# Altium schematic symbol library Fuse%.SchLib: 55 symbols
Pins are listed as number, name and electrical type; pins without a type are passive.

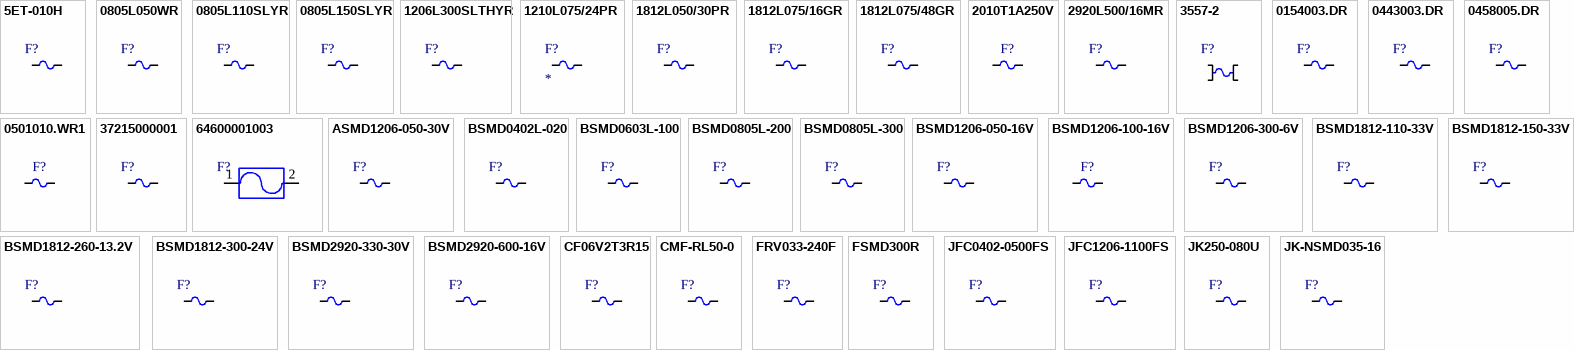
[diagram p0: symbols 5ET-010H to JK-NSMD035-16]

## 5ET-010H
designator F?
1A Plugin Fuses ROHS; Manufacturer: HOLLY; Manufacturer Part Number: 5ET-010H; Item Type: Fuse; Package: Plugin; ComponentLink1Description: LCSC; ComponentLink1URL: https://www.lcsc.com/product-detail/Fuses_HOLLY-5ET-010H_C356417.html; LCSC Part Number: C356417
footprint 5ET-010H
pins: 1, 2

## 0805L050WR
designator F?
6V 500mA 100A 1A 0805 Resettable Fuses ROHS; Manufacturer: Littelfuse; Manufacturer Part Number: 0805L050WR; Item Type: Fuse; Supplier: DigiKey; Supplier Part Number: F2772CT-ND; RoHS: Yes; Category: PTC Resettable Fuses; Stock: 52328; Pricing: 1=0.5, 5=0.41, 10=0.378, 50=0.314, 100=0.2897, 250=0.2604, 500=0.2402, 1000=0.2215 (USD); Voltage Rating: 6V; Width: 1.2mm; Height: 1.25mm; Lead Free: 5697LeadFree; ComponentLink1URL: https://datasheet.ciiva.com/326/littelfuse-ptc-0805l-326196.pdf?src-supplier=Digikey; ComponentLink1Description: https://datasheet.ciiva.com/326/littelfuse-ptc-0805l-326196.pdf?src-supplier=Digikey; ComponentLink2URL: https://datasheet.ciiva.com/4501/littelfuse-0805l-32472-4501285.pdf?src-supplier=Mouser; ComponentLink2Description: https://datasheet.ciiva.com/4501/littelfuse-0805l-32472-4501285.pdf?src-supplier=Mouser; ComponentLink3URL: https://datasheet.ciiva.com/28410/147852-28410764.pdf?src-supplier=Element14; ComponentLink3Description: https://datasheet.ciiva.com/28410/147852-28410764.pdf?src-supplier=Element14; ComponentLink4URL: https://datasheet.ciiva.com/8005/littelfuse-0805-8005343.pdf?src-supplier=Element14; ComponentLink4Description: https://datasheet.ciiva.com/8005/littelfuse-0805-8005343.pdf?src-supplier=Element14; ComponentLink5URL: https://datasheet.ciiva.com/1273/611626-1273580.pdf?src-supplier=Element14; ComponentLink5Description: https://datasheet.ciiva.com/1273/611626-1273580.pdf?src-supplier=Element14; ComponentLink6URL: https://datasheet.ciiva.com/15186/getdatasheetpartid-27833-15186860.pdf?src-supplier=Verical; ComponentLink6Description: https://datasheet.ciiva.com/15186/getdatasheetpartid-27833-15186860.pdf?src-supplier=Verical; ComponentLink7URL: https://datasheet.ciiva.com/16389/littelfuse-0805-16389019.pdf?src-supplier=Future+Electronics; ComponentLink7Description: https://datasheet.ciiva.com/16389/littelfuse-0805-16389019.pdf?src-supplier=Future+Electronics; ComponentLink8URL: https://datasheet.ciiva.com/326/littelfuse-ptc-0805l-326197.pdf?src-supplier=Digikey; ComponentLink8Description: https://datasheet.ciiva.com/326/littelfuse-ptc-0805l-326197.pdf?src-supplier=Digikey; ComponentLink9URL: https://datasheet.ciiva.com/326/littelfuse-ptc-0805l-326198.pdf?src-supplier=Digikey; ComponentLink9Description: https://datasheet.ciiva.com/326/littelfuse-ptc-0805l-326198.pdf?src-supplier=Digikey; LCSC Part Number: C207022
footprint Fuse-0805
pins: 1, 2

## 0805L110SLYR
designator F?
PTC RESET FUSE 6V 1.1A 0805; Manufacturer: Littelfuse; Manufacturer Part Number: 0805L110SLYR; Item Type: Fuses; Supplier: Digikey; LCSC Part Number: C207024; RoHS: Yes; Stock: 3032; Pricing: 1=1.74, 5=1.448, 10=1.339, 50=1.1156, 100=1.0309, 250=0.92832, 500=0.85714, 1000=0.79108 (USD); ComponentLink1URL: https://datasheet.ciiva.com/326/littelfuse-resettable-ptcs-lorho-datasheet-326160.pdf?src-supplier=Digikey; ComponentLink1Description: https://datasheet.ciiva.com/326/littelfuse-resettable-ptcs-lorho-datasheet-326160.pdf?src-supplier=Digikey; ComponentLink2URL: https://datasheet.ciiva.com/28410/949281-28410775.pdf?src-supplier=Element14; ComponentLink2Description: https://datasheet.ciiva.com/28410/949281-28410775.pdf?src-supplier=Element14
footprint Fuse-0805
pins: 1, 2

## 0805L150SLYR
designator F?
6V 1.5A 50A 3A 0805 Resettable Fuses ROHS; Manufacturer: Littelfuse; Manufacturer Part Number: 0805L150SLYR; Item Type: Fuse; Supplier: Digikey; Supplier Part Number: F5763CT-ND; RoHS: Yes; Category: PTC Resettable Fuses; Stock: 3921; Pricing: 1=1.78, 5=1.472, 10=1.358, 50=1.1266, 100=1.0394, 250=0.93396, 500=0.86106, 1000=0.7935 (USD); ComponentLink1URL: https://datasheet.ciiva.com/7438/littelfuse-ptc-lorho-datasheet-pdf-7438472.pdf?src-supplier=Digikey; ComponentLink1Description: https://datasheet.ciiva.com/7438/littelfuse-ptc-lorho-datasheet-pdf-7438472.pdf?src-supplier=Digikey; ComponentLink2URL: https://datasheet.ciiva.com/7438/littelfuse-ptc-lorho-datasheet-pdf-7438476.pdf?src-supplier=Digikey; ComponentLink2Description: https://datasheet.ciiva.com/7438/littelfuse-ptc-lorho-datasheet-pdf-7438476.pdf?src-supplier=Digikey; ComponentLink3URL: https://datasheet.ciiva.com/7438/littelfuse-ptc-lorho-datasheet-pdf-7438479.pdf?src-supplier=Digikey; ComponentLink3Description: https://datasheet.ciiva.com/7438/littelfuse-ptc-lorho-datasheet-pdf-7438479.pdf?src-supplier=Digikey; LCSC Part Number: C207025
footprint Fuse-0805
pins: 1, 2

## 1206L300SLTHYR
designator F?
PTC RESET FUSE 6V 3A 1206; Manufacturer: Littelfuse; Manufacturer Part Number: 1206L300SLTHYR; Max Current Rating: 50A; Resistance: 20mR; Power Dissipation: 800mW; Trip Current: 6A; Time to Trip: 4s; Approvals: UL,TUV; Supplier 1: Arrow Electronics; RoHS: Yes; Category: PTC Resettable Fuses; Stock 1: 4000; Pricing 1: 4000=0.60290 (USD); Case/Package: 1206; Case Code (Metric): 3216; Case Code (Imperial): 1206; Min Operating Temperature: -40°C; Max Operating Temperature: 85°C; Package Quantity: 4000; Packaging: Tape and Reel; Termination: SMD/SMT; Max Voltage Rating (DC): 6V; Hold Current: 3A; Voltage Rating (DC): 6V; Operating Supply Voltage: 6V; Series: POLY-FUSE®, LoRho™; Lead Free: Lead Free; RoHS Compliant: Yes; ComponentLink1URL: https://datasheet.ciiva.com/7438/littelfuse-lorho-ptc-7438567.pdf?src-supplier=Digi-Key; ComponentLink1Description: https://datasheet.ciiva.com/7438/littelfuse-lorho-ptc-7438567.pdf?src-supplier=Digi-Key; ComponentLink2URL: https://datasheet.ciiva.com/7438/littelfuse-lorho-ptc-7438569.pdf?src-supplier=Digi-Key; ComponentLink2Description: https://datasheet.ciiva.com/7438/littelfuse-lorho-ptc-7438569.pdf?src-supplier=Digi-Key; ComponentLink3URL: https://datasheet.ciiva.com/7438/littelfuse-lorho-ptc-7438565.pdf?src-supplier=Digi-Key; ComponentLink3Description: https://datasheet.ciiva.com/7438/littelfuse-lorho-ptc-7438565.pdf?src-supplier=Digi-Key; Supplier Part Number 1: 1206L300SLTHYR; LCSC Part Number: C207041; Item Type: Fuse
footprint Fuse 1206 (3216 Metric) (0.126" L x 0.062" W x 0.026" H (3.20mm x 1.58mm x 0.65mm))
pins: 1, 2

## 1210L075/24PR
designator F?
24V 750mA 100A 1.5A 1210 Resettable Fuses ROHS; Manufacturer: Littlefuse; Manufacturer Part Number: 1210L075/24PR; Item Type: Fuse; Supplier: Digikey; Supplier Part Number: F4146CT-ND; RoHS: Yes; Category: PTC Resettable Fuses; Stock: 2300; Pricing: 1=0.98, 5=0.81, 10=0.747, 50=0.6196, 100=0.5716, 250=0.51376, 500=0.47378, 1000=0.43676 (USD); Current Rating: 100A; Voltage Rating: 24V; Height: 1.8mm; Lead Free: 5697LeadFree; ComponentLink1URL: https://datasheet.ciiva.com/8005/littelfuse-ptc-1210l-8005372.pdf?src-supplier=Element14; ComponentLink1Description: https://datasheet.ciiva.com/8005/littelfuse-ptc-1210l-8005372.pdf?src-supplier=Element14; ComponentLink2URL: https://datasheet.ciiva.com/326/littelfuse-ptc-1210l-326060.pdf?src-supplier=Digikey; ComponentLink2Description: https://datasheet.ciiva.com/326/littelfuse-ptc-1210l-326060.pdf?src-supplier=Digikey; ComponentLink3URL: https://datasheet.ciiva.com/326/littelfuse-ptc-1210l-326061.pdf?src-supplier=Digikey; ComponentLink3Description: https://datasheet.ciiva.com/326/littelfuse-ptc-1210l-326061.pdf?src-supplier=Digikey; ComponentLink4URL: https://datasheet.ciiva.com/326/littelfuse-ptc-1210l-326062.pdf?src-supplier=Digikey; ComponentLink4Description: https://datasheet.ciiva.com/326/littelfuse-ptc-1210l-326062.pdf?src-supplier=Digikey; LCSC Part Number: C207045
footprint FUSE-1210
pins: 1, 2

## 1812L050/30PR
designator F?
PTC RESET FUSE 30V 500MA 1812; Manufacturer: Littelfuse; Manufacturer Part Number: 1812L050/30PR; Max Current Rating: 100A; Value: 1R; Power Dissipation: 800mW; Trip Current: 1A; Time to Trip: 150ms; Approvals: cULus,TUV; Supplier: Future Electronics; Supplier Part Number: 6020221; RoHS: Yes; Category: PTC Resettable Fuses; Stock: 78000; Pricing: 2000=0.405, 4000=0.395, 6000=0.39, 10000=0.385, 20000=0.375 (USD); Mounting Technology: Surface Mount; Case/Package: 1812; Case Code (Metric): 4532; Case Code (Imperial): 1812; Min Operating Temperature: -40°C; Max Operating Temperature: 85°C; Packaging: Tape and Reel; Current Rating: 100A; Package Quantity: 2000; Termination: SMD/SMT; Max Voltage Rating (DC): 30V; Working Voltage: 30V; Voltage Rating (DC): 30V; Hold Current: 500mA; Series: POLY-FUSE®, 1812L; Lead Free: Lead Free; RoHS Compliant: Yes; Reach SVHC Compliant: Unknown; ComponentLink1URL: https://datasheet.ciiva.com/16499/littelfuse-ptc-1812l-16499880.pdf?src-supplier=Future+Electronics; ComponentLink1Description: https://datasheet.ciiva.com/16499/littelfuse-ptc-1812l-16499880.pdf?src-supplier=Future+Electronics; ComponentLink2URL: https://datasheet.ciiva.com/12544/littelfuse-ptc-1812l-12544459.pdf?src-supplier=Mouser; ComponentLink2Description: https://datasheet.ciiva.com/12544/littelfuse-ptc-1812l-12544459.pdf?src-supplier=Mouser; ComponentLink3URL: https://datasheet.ciiva.com/326/littelfuse-ptc-1812l-326063.pdf?src-supplier=Digi-Key; ComponentLink3Description: https://datasheet.ciiva.com/326/littelfuse-ptc-1812l-326063.pdf?src-supplier=Digi-Key; ComponentLink4URL: https://datasheet.ciiva.com/326/littelfuse-ptc-1812l-326064.pdf?src-supplier=Digi-Key; ComponentLink4Description: https://datasheet.ciiva.com/326/littelfuse-ptc-1812l-326064.pdf?src-supplier=Digi-Key; ComponentLink5URL: https://datasheet.ciiva.com/326/littelfuse-ptc-1812l-326065.pdf?src-supplier=Digi-Key; ComponentLink5Description: https://datasheet.ciiva.com/326/littelfuse-ptc-1812l-326065.pdf?src-supplier=Digi-Key; LCSC Part Number: C151168; Item Type: Fuse
footprint 1812-FUSE (13.2V 2.6A 40A 800mW -40?~+85? 5.2A 10mO 2.5s 50mO 1812 Resettable Fuses ROHS)
pins: 1, 2

## 1812L075/16GR
designator F?
16V 750mA 1.5A 1812 Resettable Fuses ROHS; Manufacturer: LUTE; Manufacturer Part Number: 1812L075/16GR; Package: 1812; LCSC Part Number: C19078721; Item Type: Fuses; ComponentLink1Description: LCSC; ComponentLink1URL: https://www.lcsc.com/product-detail/Resettable-Fuses_LUTE-1812L075-16GR_C19078721.html
footprint 1812-FUSE (13.2V 2.6A 40A 800mW -40?~+85? 5.2A 10mO 2.5s 50mO 1812 Resettable Fuses ROHS)
pins: 1, 2

## 1812L075/48GR
designator F?
48V 750mA 1.5A 1812 Resettable Fuses ROHS; Manufacturer: LUTE; Manufacturer Part Number: 1812L075/48GR; Package: 1812; LCSC Part Number: C19193053; Item Type: Fuses; ComponentLink1Description: LCSC; ComponentLink1URL: https://www.lcsc.com/product-detail/Resettable-Fuses_LUTE-1812L075-48GR_C19193053.html
footprint 1812-FUSE (13.2V 2.6A 40A 800mW -40?~+85? 5.2A 10mO 2.5s 50mO 1812 Resettable Fuses ROHS)
pins: 1, 2

## 2010T1A250V
designator F?
1A Plugin Fuses ROHS; Manufacturer: Walter Elec; Manufacturer Part Number: 2010T1A250V; Item Type: Fuse; Package: Plugin; LCSC Part Number: C354900; ComponentLink1Description: LCSC; ComponentLink1URL: https://www.lcsc.com/product-detail/Fuses_Walter-Elec-2010T1A250V_C354900.html
footprint 2010T1A250V
pins: 1, 2

## 2920L500/16MR
designator F?
PTC RESET FUSE 16V 5A 2920; Manufacturer: Littelfuse; Manufacturer Part Number: 2920L500/16MR; Item Type: Fuses; Current Rating: 40A; Power Dissipation: 2W; Supplier: Digikey; LCSC Part Number: C207091; RoHS: Yes; Stock: 10184; Pricing: 1=1.76, 5=1.462, 10=1.349, 50=1.1192, 100=1.0326, 250=0.92788, 500=0.85544 (USD); ComponentLink1URL: http://www.farnell.com/datasheets/2282560.pdf?src-supplier=Farnell; ComponentLink1Description: http://www.farnell.com/datasheets/2282560.pdf?src-supplier=Farnell; ComponentLink2URL: http://www.littelfuse.com/~/media/electronics/datasheets/resettable_ptcs/littelfuse_ptc_2920l_datasheet.pdf.pdf?src-supplier=Mouser; ComponentLink2Description: http://www.littelfuse.com/~/media/electronics/datasheets/resettable_ptcs/littelfuse_ptc_2920l_datasheet.pdf.pdf?src-supplier=Mouser; ComponentLink3URL: http://www.littelfuse.com/~/media/electronics/datasheets/resettable_ptcs/littelfuse_ptc_2920l_datasheet.pdf.pdf?src-supplier=Arrow+Electronics; ComponentLink3Description: http://www.littelfuse.com/~/media/electronics/datasheets/resettable_ptcs/littelfuse_ptc_2920l_datasheet.pdf.pdf?src-supplier=Arrow+Electronics; ComponentLink4URL: http://www.littelfuse.com/~/media/electronics/datasheets/resettable_ptcs/littelfuse_ptc_2920l_datasheet.pdf.pdf?src-supplier=Digikey; ComponentLink4Description: http://www.littelfuse.com/~/media/electronics/datasheets/resettable_ptcs/littelfuse_ptc_2920l_datasheet.pdf.pdf?src-supplier=Digikey; ComponentLink5URL: https://www.littelfuse.com/~/media/electronics/datasheets/resettable_ptcs/littelfuse_ptc_2920l_datasheet.pdf.pdf?src-supplier=Digikey; ComponentLink5Description: https://www.littelfuse.com/~/media/electronics/datasheets/resettable_ptcs/littelfuse_ptc_2920l_datasheet.pdf.pdf?src-supplier=Digikey; ComponentLink6URL: http://www.farnell.com/datasheets/2140491.pdf?src-supplier=Element14; ComponentLink6Description: http://www.farnell.com/datasheets/2140491.pdf?src-supplier=Element14; ComponentLink7URL: http://www.littelfuse.com/~/media/electronics/datasheets/resettable_ptcs/littelfuse_ptc_2920l_datasheet.pdf.pdf?src-supplier=Verical; ComponentLink7Description: http://www.littelfuse.com/~/media/electronics/datasheets/resettable_ptcs/littelfuse_ptc_2920l_datasheet.pdf.pdf?src-supplier=Verical; ComponentLink8URL: http://www.littelfuse.com/~/media/electronics/datasheets/resettable_ptcs/littelfuse_ptc_2920l_datasheet.pdf.pdf?src-supplier=Quest; ComponentLink8Description: http://www.littelfuse.com/~/media/electronics/datasheets/resettable_ptcs/littelfuse_ptc_2920l_datasheet.pdf.pdf?src-supplier=Quest; ComponentLink9URL: http://www.littelfuse.com/~/media/electronics/datasheets/resettable_ptcs/littelfuse_ptc_2920l_datasheet.pdf.pdf?src-supplier=TTI; ComponentLink9Description: http://www.littelfuse.com/~/media/electronics/datasheets/resettable_ptcs/littelfuse_ptc_2920l_datasheet.pdf.pdf?src-supplier=TTI
footprint Fuse-2920
pins: 1, 2

## 3557-2
designator F?
FUSE BLOCK BLADE 500V 30A PCB; Manufacturer: Keystone Electronics; Manufacturer Part Number: 3557-2; Color: Black; Material: Brass,Tin,Nylon; Current Rating: 20A; Number of Circuits: 1; Illumination Type: Illuminated; Fuse Type: Automotive; Fuse Size: ATO, ATC, or Mini ATO, ATC; Item Type: Fuse Holder; Supplier 1: Future Electronics; RoHS: Yes; Category: Fuse Holders; Stock 1: 129820; Pricing 1: 1=0.72500, 75=0.69000, 250=0.66500, 750=0.64000, 2500=0.59000 (USD); Mount: Vertical,PCB,Through Hole; Contact Plating: Tin; Contact Material: Brass; Min Operating Temperature: -50°C; Max Operating Temperature: 145°C; Package Quantity: 1; Series: -; Termination: PC Pin; Orientation: Vertical; Voltage Rating (AC): 500V; Voltage: 500V; Number of Poles: 1; Fuse Current: 20A; Length: 19.8mm; Depth: 6.8mm; Size: 0.265inch; Lead Free: Lead Free; Reach SVHC Compliant: Yes; Flammability Rating: UL94 V-0; Supplier Part Number 1: 6424071; LCSC Part Number: C352820; ComponentLink1Description: LCSC; ComponentLink1URL: https://www.lcsc.com/search?q=3557-2
footprint 3557-2
pins: 1, 2, 3, 4

## 0154003.DR
designator F?
FUSE BRD MNT 3A 125VAC/VDC 2SMD; Manufacturer: Littelfuse; Manufacturer Part Number: 0154003.DR; Item Type: Fuses; Value: 22.7mR; Supplier: Digikey; LCSC Part Number: C206912; RoHS: Yes; Stock: 5902; Pricing: 1=2.71, 5=2.246, 10=2.073, 50=1.7196, 100=1.5862, 250=1.425, 500=1.3135 (USD); Lead Free: 5697LeadFree; RoHS Compliant: 5897YesNo; Flammability Rating: 5813Flammability; ComponentLink1URL: https://datasheet.ciiva.com/29697/1708924-29697492.pdf?src-supplier=Jameco; ComponentLink1Description: https://datasheet.ciiva.com/29697/1708924-29697492.pdf?src-supplier=Jameco; ComponentLink2URL: https://datasheet.ciiva.com/14102/aa154xxx-data-e-14102960.pdf?src-supplier=Distrelec; ComponentLink2Description: https://datasheet.ciiva.com/14102/aa154xxx-data-e-14102960.pdf?src-supplier=Distrelec; ComponentLink3URL: https://datasheet.ciiva.com/28499/88932-28499727.pdf?src-supplier=Element14; ComponentLink3Description: https://datasheet.ciiva.com/28499/88932-28499727.pdf?src-supplier=Element14; ComponentLink4URL: https://datasheet.ciiva.com/1268/154-1268659.pdf?src-supplier=Element14; ComponentLink4Description: https://datasheet.ciiva.com/1268/154-1268659.pdf?src-supplier=Element14
footprint 0154003.DR
pins: 1, 2

## 0443003.DR
designator F?
FUSE BOARD MOUNT 3A 250VAC 2SMD; Manufacturer: Littelfuse; Manufacturer Part Number: 0443003.DR; Item Type: Fuses; Supplier: Arrow Electronics; LCSC Part Number: C187539; RoHS: Yes; Stock: 5770; Pricing: 1=0.6426 (USD); ComponentLink1URL: https://datasheet.ciiva.com/16300/littelfuse-fuse-443-16300286.pdf?src-supplier=Future+Electronics; ComponentLink1Description: https://datasheet.ciiva.com/16300/littelfuse-fuse-443-16300286.pdf?src-supplier=Future+Electronics; ComponentLink2URL: https://datasheet.ciiva.com/7991/littelfuse-fuse-443-7991882.pdf?src-supplier=Element14; ComponentLink2Description: https://datasheet.ciiva.com/7991/littelfuse-fuse-443-7991882.pdf?src-supplier=Element14; ComponentLink3URL: https://datasheet.ciiva.com/1730/717394-1730431.pdf?src-supplier=Newark; ComponentLink3Description: https://datasheet.ciiva.com/1730/717394-1730431.pdf?src-supplier=Newark; ComponentLink4URL: https://datasheet.ciiva.com/299/littelfuse-fuse-443-299873.pdf?src-supplier=Digikey; ComponentLink4Description: https://datasheet.ciiva.com/299/littelfuse-fuse-443-299873.pdf?src-supplier=Digikey; ComponentLink5URL: https://datasheet.ciiva.com/299/littelfuse-fuse-443-299874.pdf?src-supplier=Digikey; ComponentLink5Description: https://datasheet.ciiva.com/299/littelfuse-fuse-443-299874.pdf?src-supplier=Digikey; ComponentLink6URL: https://datasheet.ciiva.com/299/littelfuse-fuse-443-299875.pdf?src-supplier=Digikey; ComponentLink6Description: https://datasheet.ciiva.com/299/littelfuse-fuse-443-299875.pdf?src-supplier=Digikey
footprint 0443003.DR
pins: 1, 2

## 0458005.DR
designator F?
FUSE BRD MNT 5A 32VAC 75VDC 1206; Manufacturer: Littelfuse; Manufacturer Part Number: 0458005.DR; Supplier: Rs; Supplier Part Number: 1740294; RoHS: Yes; Category: Fuses; Stock: 1005; Pricing: 1=0.6241, 10=0.73892, 25=0.71895, 50=0.70003 (GBP); ComponentLink1URL: https://datasheet.ciiva.com/1730/337915-1730547.pdf?src-supplier=Newark; ComponentLink1Description: https://datasheet.ciiva.com/1730/337915-1730547.pdf?src-supplier=Newark; ComponentLink2URL: https://datasheet.ciiva.com/7991/337915-7991910.pdf?src-supplier=Element14; ComponentLink2Description: https://datasheet.ciiva.com/7991/337915-7991910.pdf?src-supplier=Element14; ComponentLink3URL: https://datasheet.ciiva.com/299/littelfuse-fuse-458-series-299786.pdf?src-supplier=Digikey; ComponentLink3Description: https://datasheet.ciiva.com/299/littelfuse-fuse-458-series-299786.pdf?src-supplier=Digikey; ComponentLink4URL: https://datasheet.ciiva.com/299/littelfuse-fuse-458-series-299787.pdf?src-supplier=Digikey; ComponentLink4Description: https://datasheet.ciiva.com/299/littelfuse-fuse-458-series-299787.pdf?src-supplier=Digikey; ComponentLink5URL: https://datasheet.ciiva.com/299/littelfuse-fuse-458-series-299788.pdf?src-supplier=Digikey; ComponentLink5Description: https://datasheet.ciiva.com/299/littelfuse-fuse-458-series-299788.pdf?src-supplier=Digikey; LCSC Part Number: C187561; Item Type: Fuse
footprint Fuse 1206 (3216 Metric) (0.126" L x 0.062" W x 0.026" H (3.20mm x 1.58mm x 0.65mm))
pins: 1, 2

## 0501010.WR1
designator F?
150A SMD Fuse 10A 32V 1206 Disposable fuses ROHS; Manufacturer: Littelfuse; Manufacturer Part Number: 0501010.WR1; Package: 1206; LCSC Part Number: C207003; Item Type: Fuses; ComponentLink1Description: LCSC; ComponentLink1URL: https://www.lcsc.com/product-detail/Disposable-fuses_Littelfuse-0501010-WR1_C207003.html
footprint Fuse 1206 (3216 Metric) (0.126" L x 0.062" W x 0.026" H (3.20mm x 1.58mm x 0.65mm))
pins: 1, 2

## 37215000001
designator F?
FUSE BOARD MNT 5A 250VAC RADIAL; Manufacturer: Littelfuse Wickmann; Manufacturer Part Number: 37215000001; Item Type: Fuses; Supplier: Digikey; LCSC Part Number: C142820; RoHS: Yes; Stock: 2122; Pricing: 1=0.96, 5=0.928, 10=0.869, 50=0.7192, 100=0.5993, 250=0.58436, 500=0.49446 (USD); ComponentLink1URL: https://datasheet.ciiva.com/299/littelfuse-fuse-372-299190.pdf?src-supplier=Digikey; ComponentLink1Description: https://datasheet.ciiva.com/299/littelfuse-fuse-372-299190.pdf?src-supplier=Digikey; ComponentLink2URL: https://datasheet.ciiva.com/16298/littelfuse-fuse-372-16298798.pdf?src-supplier=Future+Electronics; ComponentLink2Description: https://datasheet.ciiva.com/16298/littelfuse-fuse-372-16298798.pdf?src-supplier=Future+Electronics
footprint 37215000001
pins: 1, 2

## 64600001003
designator F?
FUSE BLOCK CART 250V 6.3A PCB; Manufacturer: Littelfuse Wickmann; Manufacturer Part Number: 64600001003; Color: Black; Material: Tin; Body Material: Polyamide; Number of Poles: 1; Illumination Type: Illuminated; Fuse Size: 0.197 Dia x 0.787 L (5mm x 20mm); Item Type: Fuse holder; Supplier 1: Future Electronics; RoHS: Yes; Category: Fuse Holders; Stock 1: 9600; Pricing 1: 100=0.45500, 400=0.43500, 1500=0.41500, 3000=0.41000, 7500=0.39000 (USD); Mount: Through Hole; Number of Pins: 2; Contact Material: Copper Alloy; Contact Plating: Tin; Min Operating Temperature: -25°C; Max Operating Temperature: 70°C; Voltage Rating (DC): 250V; Voltage Rating (AC): 250V; Current Rating: 6.3A; Package Quantity: 1000; Voltage Rating: 250V; Packaging: Bulk; Number of Circuits: 1; Termination: PC Pin; Voltage: 250V; Fuse Current: 6.3A; Series: 646; Orientation: Horizontal; Length: 25.8mm; Width: 12mm; Depth: 5.5mm; Lead Free: Lead Free; Flammability Rating: UL94 V-1; ComponentLink1URL: https://datasheet.ciiva.com/25620/0900766b81196eda-25620105.pdf?src-supplier=Rs; ComponentLink1Description: https://datasheet.ciiva.com/25620/0900766b81196eda-25620105.pdf?src-supplier=Rs; ComponentLink2URL: https://datasheet.ciiva.com/14119/gqlittelfuse-sicherungshalter-646-en-14119833.pdf?src-supplier=Distrelec; ComponentLink2Description: https://datasheet.ciiva.com/14119/gqlittelfuse-sicherungshalter-646-en-14119833.pdf?src-supplier=Distrelec; ComponentLink3URL: https://datasheet.ciiva.com/23593/43388-23593468.pdf?src-supplier=Newark; ComponentLink3Description: https://datasheet.ciiva.com/23593/43388-23593468.pdf?src-supplier=Newark; ComponentLink4URL: https://datasheet.ciiva.com/1270/1480080-1270114.pdf?src-supplier=Element14; ComponentLink4Description: https://datasheet.ciiva.com/1270/1480080-1270114.pdf?src-supplier=Element14; ComponentLink5URL: https://datasheet.ciiva.com/4480/646-648-640-lf-050901-4480295.pdf?src-supplier=Mouser; ComponentLink5Description: https://datasheet.ciiva.com/4480/646-648-640-lf-050901-4480295.pdf?src-supplier=Mouser; ComponentLink6URL: https://datasheet.ciiva.com/15187/getdatasheetpartid-57320-15187869.pdf?src-supplier=Verical; ComponentLink6Description: https://datasheet.ciiva.com/15187/getdatasheetpartid-57320-15187869.pdf?src-supplier=Verical; ComponentLink7URL: https://datasheet.ciiva.com/7660/646-648-640-lf-050901-7660727.pdf?src-supplier=Element14; ComponentLink7Description: https://datasheet.ciiva.com/7660/646-648-640-lf-050901-7660727.pdf?src-supplier=Element14; ComponentLink8URL: https://datasheet.ciiva.com/295/646-648-640-lf-050901-295754.pdf?src-supplier=Digi-Key; ComponentLink8Description: https://datasheet.ciiva.com/295/646-648-640-lf-050901-295754.pdf?src-supplier=Digi-Key; LCSC Part Number: C206887; ComponentLink9Description: LCSC; ComponentLink9URL: https://www.lcsc.com/product-detail/Fuse-Holders_Littelfuse-64600001003_C206887.html
footprint 64600001003
pins: 1, 2

## ASMD1206-050-30V
designator F?
30V 500mA 100A 1A 1206 Resettable Fuses ROHS; Manufacturer: Shenzhen JDT Fuse; Manufacturer Part Number: ASMD1206-050-30V; Package: 1206; LCSC Part Number: C2982267; Item Type: Fuses; ComponentLink1Description: LCSC; ComponentLink1URL: https://www.lcsc.com/product-detail/Resettable-Fuses_Shenzhen-JDT-span-style-background-color-ff0-Fuse-span-ASMD1206-050-30V_C2982267.html
footprint Fuse 1206 (3216 Metric) (0.126" L x 0.062" W x 0.026" H (3.20mm x 1.58mm x 0.65mm))
pins: 1, 2

## BSMD0402L-020
designator F?
6V 200mA 40A 500mA 0402 Resettable Fuses ROHS; Manufacturer: BHFUSE; Manufacturer Part Number: BSMD0402L-020; Package: 0402; LCSC Part Number: C914085; Item Type: Fuses; ComponentLink1Description: LCSC; ComponentLink1URL: https://www.lcsc.com/product-detail/Resettable-Fuses_BHFUSE-BSMD0402L-020_C914085.html
footprint Fuse 0402
pins: 1, 2

## BSMD0603L-100
designator F?
6V 1A 50A 1W -40℃~+85℃ 2A 9mΩ 0.5s 80mΩ 0603 Resettable Fuses ROHS; Manufacturer: BHFUSE; Manufacturer Part Number: BSMD0603L-100; Item Type: Fuse; ComponentLink1Description: LCSC; ComponentLink1URL: https://lcsc.com/product-detail/Resettable-Fuses_BHFUSE-BSMD0603L-100_C2757929.html; Package: 0603; LCSC Part Number: C2757929
footprint fuse-0603
pins: 1, 2

## BSMD0805L-200
designator F?
6V 2A 50A 1W -40℃~+85℃ 4A 4mΩ 5s 45mΩ 0805 Resettable Fuses ROHS; Manufacturer: BHFUSE; Manufacturer Part Number: BSMD0805L-200; Item Type: Fuse; Package: 0805; LCSC Part Number: C2757931; ComponentLink1Description: LCSC; ComponentLink1URL: https://www.lcsc.com/product-detail/Resettable-Fuses_BHFUSE-BSMD0805L-200_C2757931.html
footprint Fuse-0805
pins: 1, 2

## BSMD0805L-300
designator F?
6V 3A 50A 1W -40℃~+85℃ 6A 3mΩ 5s 30mΩ 0805 Resettable Fuses ROHS; Manufacturer: BHFUSE; Manufacturer Part Number: BSMD0805L-300; Item Type: Fuse; Package: 0805; LCSC Part Number: C2757932; ComponentLink1Description: LCSC; ComponentLink1URL: https://www.lcsc.com/product-detail/Resettable-Fuses_BHFUSE-BSMD0805L-300_C2757932.html
footprint Fuse-0805
pins: 1, 2

## BSMD1206-050-16V
designator F?
16V 500mA 100A 1A 1206 Resettable Fuses ROHS; Manufacturer: BHFUSE; Manufacturer Part Number: BSMD1206-050-16V; Package: 1206; LCSC Part Number: C883124; Item Type: Fuses; ComponentLink1Description: LCSC; ComponentLink1URL: https://www.lcsc.com/product-detail/Resettable-Fuses_BHFUSE-BSMD1206-050-16V_C883124.html
footprint Fuse 1206 (3216 Metric) (0.126" L x 0.062" W x 0.026" H (3.20mm x 1.58mm x 0.65mm))
pins: 1, 2

## BSMD1206-100-16V
designator F?
16V 1A 100A 1.8A 1206 Resettable Fuses ROHS; Manufacturer: BHFUSE; Manufacturer Part Number: BSMD1206-100-16V; Supplier: LCSC; LCSC Part Number: C883131; RoHS: No
footprint Fuse 1206 (3216 Metric) (0.126" L x 0.062" W x 0.026" H (3.20mm x 1.58mm x 0.65mm))
pins: 1, 2

## BSMD1206-300-6V
designator F?
6V 3A 100A 6A 1206 Resettable Fuses ROHS; Manufacturer: BHFUSE; Manufacturer Part Number: BSMD1206-300-6V; Package: 1206; LCSC Part Number: C883136; Item Type: Fuses; ComponentLink1Description: LCSC; ComponentLink1URL: https://www.lcsc.com/product-detail/Resettable-Fuses_BHFUSE-BSMD1206-300-6V_C883136.html?s_z=n_BSMD1206-300-6V
footprint Fuse 1206 (3216 Metric) (0.126" L x 0.062" W x 0.026" H (3.20mm x 1.58mm x 0.65mm))
pins: 1, 2

## BSMD1812-110-33V
designator F?
33V 1.1A 40A 2.2A 1812 Resettable Fuses ROHS; Manufacturer: BHFUSE; Manufacturer Part Number: BSMD1812-110-33V; Item Type: Fuse; Package: 1812; LCSC Part Number: C883150; ComponentLink1Description: LCSC; ComponentLink1URL: https://www.lcsc.com/product-detail/Resettable-Fuses_BHFUSE-BSMD1812-110-33V_C883150.html
footprint Fuse-1812_
pins: 1, 2

## BSMD1812-150-33V
designator F?
33V 1.5A 40A 3A 1812 Resettable Fuses ROHS; Manufacturer: BHFUSE; Manufacturer Part Number: BSMD1812-150-33V; Item Type: Fuse; Package: 1812; LCSC Part Number: C883154; ComponentLink1Description: LCSC; ComponentLink1URL: https://www.lcsc.com/product-detail/Resettable-Fuses_BHFUSE-BSMD1812-150-33V_C883154.html
footprint Fuse-1812_
pins: 1, 2

## BSMD1812-260-13.2V
designator F?
13.2V 2.6A 40A 800mW -40℃~+85℃ 5.2A 10mΩ 2.5s 50mΩ 1812 Resettable Fuses ROHS; Manufacturer: BHFUSE; Manufacturer Part Number: BSMD1812-260-13.2V; Item: 1812; Item Type: Fuse; Amps: 2.6A-40A; LCSC Part Number: C883159; Volts: 13.2V; Watt: 800mW; ComponentLink1Description: LCSC; ComponentLink1URL: https://www.lcsc.com/product-detail/Resettable-Fuses_BHFUSE-BSMD1812-260-13-2V_C883159.html
footprint 1812-FUSE (13.2V 2.6A 40A 800mW -40?~+85? 5.2A 10mO 2.5s 50mO 1812 Resettable Fuses ROHS)
pins: 1, 2

## BSMD1812-300-24V
designator F?
24V 3A 40A 6A 1812 Resettable Fuses ROHS; Manufacturer: BHFUSE; Manufacturer Part Number: BSMD1812-300-24V; Item Type: Fuse; Supplier: LCSC; LCSC Part Number: C7500481; RoHS: No; ComponentLink1Description: LCSC; ComponentLink1URL: https://www.lcsc.com/product-detail/Resettable-Fuses_BHFUSE-BSMD1812-300-24V_C7500481.html
footprint Fuse-1812_
pins: 1, 2

## BSMD2920-330-30V
designator F?
30V 3.3A 40A 6.6A 2920 Resettable Fuses ROHS; Manufacturer: BHFUSE; Manufacturer Part Number: BSMD2920-330-30V; Item Type: Fuse; Supplier: LCSC; LCSC Part Number: C22368176; RoHS: No; ComponentLink1Description: LCSC; ComponentLink1URL: https://www.lcsc.com/product-detail/Resettable-Fuses_BHFUSE-BSMD2920-330-30V_C22368176.html
footprint Fuse-2920
pins: 1, 2

## BSMD2920-600-16V
designator F?
16V 6A 40A 12A 2920 Resettable Fuses ROHS; Manufacturer: BHFUSE; Manufacturer Part Number: BSMD2920-600-16V; Item Type: Fuse; Package: 2920; LCSC Part Number: C910847; ComponentLink1Description: LCSC; ComponentLink1URL: https://www.lcsc.com/product-detail/Resettable-Fuses_BHFUSE-BSMD2920-600-16V_C910847.html
footprint Fuse-2920
pins: 1, 2

## CF06V2T3R15
designator F?
50A SMD Fuse 3.15A 24V 0603 Disposable fuses ROHS; Manufacturer: TA-I Tech; Manufacturer Part Number: CF06V2T3R15; Package: 0603; LCSC Part Number: C163108; Item Type: Fuses; ComponentLink1Description: LCSC; ComponentLink1URL: https://www.lcsc.com/product-detail/Disposable-fuses_TA-I-Tech-CF06V2T3R15_C163108.html
footprint Fuse-0603
pins: 1, 2

## CMF-RL50-0
designator F?
PTC RESET FUSE 220V 65MA RADIAL; Manufacturer: Bourns; Manufacturer Part Number: CMF-RL50-0; Current Rating: 3A; Value: 50R; Trip Current: 150mA; Time to Trip: 0.15s; Lead Length: 3mm; Lead Diameter: 0.6mm; Body Height: 13.5mm; Body Length: 9.8mm; Approvals: UL; Supplier: Rs; Supplier Part Number: 6926778P; RoHS: Yes; Category: PTC Resettable Fuses; Stock: 520; Pricing: 50=0.448, 100=0.396, 250=0.344, 500=0.316 (GBP); Mounting Technology: Through Hole; Case/Package: Radial; Pins: 2; Contact Plating: Tin; Min Operating Temperature: -40°C; Max Operating Temperature: 125°C; Package Quantity: 600; Packaging: Bulk; Max Voltage Rating (AC): 220V; Max Current Rating: 3A; Voltage Rating: 220V; Termination: Radial; Voltage Rating (AC): 220V; Hold Current: 65mA; Series: CMF-RL; Length: 13.5mm; Width: 9.8mm; Height: 5mm; Lead Pitch: 5.08mm; Terminal Pitch: 5.08mm; Wire/Cable Diameter: 0.6mm; Reach SVHC Compliant: No; RoHS Compliant: Yes; ComponentLink1URL: https://datasheet.ciiva.com/328/cmfrl-328193.pdf?src-supplier=Digikey; ComponentLink1Description: https://datasheet.ciiva.com/328/cmfrl-328193.pdf?src-supplier=Digikey; ComponentLink2URL: https://datasheet.ciiva.com/3020/cmfrl-3020260.pdf?src-supplier=Avnet; ComponentLink2Description: https://datasheet.ciiva.com/3020/cmfrl-3020260.pdf?src-supplier=Avnet; ComponentLink3URL: https://datasheet.ciiva.com/1273/1727900-1273966.pdf?src-supplier=Element14; ComponentLink3Description: https://datasheet.ciiva.com/1273/1727900-1273966.pdf?src-supplier=Element14; LCSC Part Number: C1562108; Item Type: Fuse
footprint CMF-RL50-0
pins: 1, 2

## FRV033-240F
designator F?
240V 330mA 4.5A 740mA Plugin Resettable Fuses ROHS; Manufacturer: Fuzetec Tech; Manufacturer Part Number: FRV033-240F; Item type: Fuse; ComponentLink1Description: LCSC; ComponentLink1URL: https://www.lcsc.com/product-detail/Resettable-Fuses_Fuzetec-Tech-FRV033-240F_C2687093.html; Package: Plugin; LCSC Part Number: C2687093
footprint FRV033-240F
pins: 1, 2

## FSMD300R
designator F?
6V 3A 100A 5A 1812 Resettable Fuses ROHS; Manufacturer: Fuzetec Tech; Manufacturer Part Number: FSMD300R; Item Type: Fuse; Package: 1812; LCSC Part Number: C181900; ComponentLink1Description: LCSC; ComponentLink1URL: https://www.lcsc.com/product-detail/Resettable-Fuses_Fuzetec-Tech-FSMD300R_C181900.html
footprint Fuse-1812_
pins: 1, 2

## JFC0402-0500FS
designator F?
35A -55℃~+90℃ SMD Fuse 500mA 32V 0402 Fuses ROHS; Manufacturer: Shenzhen JDT Fuse; Manufacturer Part Number: JFC0402-0500FS; Package: 0402; LCSC Part Number: C136320; Item Type: Fuse; ComponentLink1Description: LCSC; ComponentLink1URL: https://www.lcsc.com/product-detail/Fuses_Shenzhen-JDT-Fuse-JFC0402-0500FS_C136320.html
footprint Fuse 0402
pins: 1, 2

## JFC1206-1100FS
designator F?
50A SMD Fuse 1A 63V 63V 1206 Disposable fuses ROHS / PTC RESET FUSE 6V 3A 1206; Manufacturer: Shenzhen JDT Fuse; Manufacturer Part Number: JFC1206-1100FS; LCSC Part Number: C136343; Item Type: Fuse; ComponentLink1Description: LCSC; ComponentLink1URL: https://www.lcsc.com/product-detail/Disposable-fuses_Shenzhen-JDT-Fuse-JFC1206-1100FS_C136343.html
footprint Fuse 1206 (3216 Metric) (0.126" L x 0.062" W x 0.026" H (3.20mm x 1.58mm x 0.65mm))
pins: 1, 2

## JK250-080U
designator F?
250V 80mA 3A 160mA Plugin Resettable Fuses ROHS; Manufacturer: Jinrui Electronic Materials Co.; Manufacturer Part Number: JK250-080U; Item Type: Fuse; Package: Plugin; LCSC Part Number: C369127; ComponentLink1Description: LCSC; ComponentLink1URL: https://www.lcsc.com/product-detail/Resettable-Fuses_Jinrui-Electronic-Materials-Co-JK250-080U_C369127.html
footprint JK250-080U
pins: 1, 2

## JK-NSMD035-16
designator F?
16V 0.35A 100A 0.75A -40℃~+85℃ 0.25Ω 0.1s 1.3Ω 1206 Resettable Fuses ROHS; Manufacturer: Jinrui Electronic Materials Co.; Manufacturer Part Number: JK-NSMD035-16; Item Type: Fuse; Package: 1206; LCSC Part Number: C2830240; ComponentLink1Description: LCSC; ComponentLink1URL: https://www.lcsc.com/product-detail/Resettable-Fuses_Jinrui-Electronic-Materials-Co-JK-NSMD035-16_C2830240.html
footprint Fuse 1206 (3216 Metric) (0.126" L x 0.062" W x 0.026" H (3.20mm x 1.58mm x 0.65mm))
pins: 1, 2

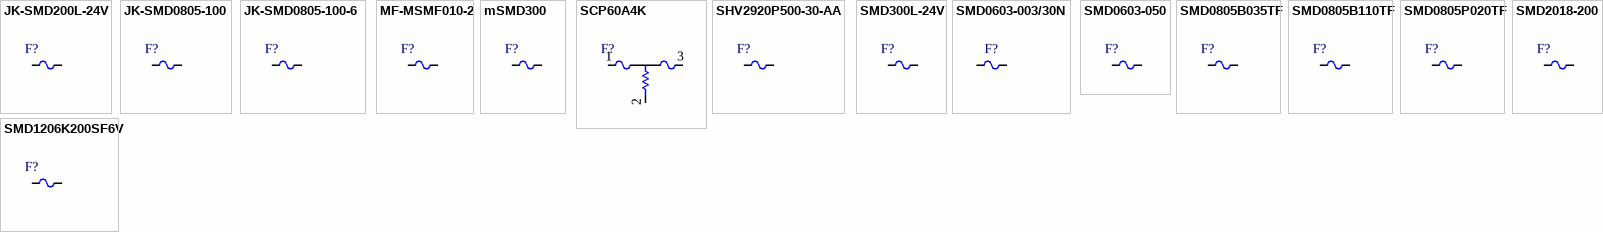
[diagram p1: symbols JK-SMD200L-24V to SMD2018-200]

## JK-SMD200L-24V
designator F?
24V 2A 100A 1.5W -40℃~+85℃ 4A 20mΩ 4.5s 120mΩ 2920 Resettable Fuses ROHS; Manufacturer: Jinrui Electronic Materials; Manufacturer Part Number: JK-SMD200L-24V; Item Type: FUSE; Package: 2920; LCSC Part Number: C692154; ComponentLink1Description: LCSC; ComponentLink1URL: https://www.lcsc.com/product-detail/PTC-Resettable-Fuses_Jinrui-Electronic-Materials-Co-JK-SMD200L-24V_C692154.html
footprint Fuse-2920
pins: 1, 2

## JK-SMD0805-100
designator F?
6V 1A 100A 1.95A 300ms 0805 Resettable Fuses ROHS; Manufacturer: Jinrui Electronic Materials Co.; Manufacturer Part Number: JK-SMD0805-100; Item Type: Fuse; Package: 0805; LCSC Part Number: C369152; ComponentLink1Description: LCSC; ComponentLink1URL: https://www.lcsc.com/product-detail/Resettable-Fuses_Jinrui-Electronic-Materials-Co-JK-SMD0805-100_C369152.html
footprint Fuse-0805
pins: 1, 2

## JK-SMD0805-100-6
designator F?
6V 1A 100A 1.95A - Resettable Fuses ROHS; Manufacturer: Jinrui Electronic Materials Co.; Manufacturer Part Number: JK-SMD0805-100-6; Item Type: Fuse; Package: 0805; LCSC Part Number: C5307781; ComponentLink1Description: LCSC; ComponentLink1URL: https://www.lcsc.com/product-detail/Resettable-Fuses_Jinrui-Electronic-Materials-Co-JK-SMD0805-100-6_C5307781.html
footprint Fuse-0805
pins: 1, 2

## MF-MSMF010-2
designator F?
60V 100mA 40A 300mA 1812 Resettable Fuses ROHS; Manufacturer: Bourns; Manufacturer Part Number: MF-MSMF010-2; Time to Trip: 1.5s; Item Type: Fuse; Supplier 1: Arrow Electronics; RoHS: Yes; Category: Fuses; Stock 1: 75000; Pricing 1: 3000=0.1392 (USD); Mounting Technology: Surface Mount; Case Code (Imperial): 1812; Case Code (Metric): 4532; Min Operating Temperature: -40°C; Max Operating Temperature: 85°C; Packaging: Cut Tape; Max Current Rating: 40A; Hold Current: 100mA; Trip Current: 300mA; Series: Multifuse®, MF-MSMF; Voltage Rating: 60V; Ratings: AEC-Q200; RoHS Compliant: Yes; ComponentLink1URL: http://www.farnell.com/datasheets/2264697.pdf?src-supplier=Farnell; ComponentLink1Description: http://www.farnell.com/datasheets/2264697.pdf?src-supplier=Farnell; ComponentLink2URL: http://www.farnell.com/datasheets/2264697.pdf?src-supplier=Newark; ComponentLink2Description: http://www.farnell.com/datasheets/2264697.pdf?src-supplier=Newark; ComponentLink3URL: http://www.farnell.com/datasheets/2264697.pdf?src-supplier=Element14; ComponentLink3Description: http://www.farnell.com/datasheets/2264697.pdf?src-supplier=Element14; ComponentLink4URL: http://www.farnell.com/datasheets/1786007.pdf?src-supplier=Newark; ComponentLink4Description: http://www.farnell.com/datasheets/1786007.pdf?src-supplier=Newark; ComponentLink5URL: https://www.bourns.com/docs/Product-Datasheets/mfmsmf.pdf?src-supplier=Digi-Key; ComponentLink5Description: https://www.bourns.com/docs/Product-Datasheets/mfmsmf.pdf?src-supplier=Digi-Key; Supplier Part Number 1: MF-MSMF010-2; LCSC Part Number: C12430
footprint Fuse-1812_
pins: 1, 2

## mSMD300
designator F?
8V 3A 100A 5A 1812 Resettable Fuses ROHS; Manufacturer: TECHFUSE; Manufacturer Part Number: mSMD300; Footprint: 1812; ComponentLink1Description: LCSC; ComponentLink1URL: https://www.lcsc.com/product-detail/Resettable-Fuses_TECHFUSE-mSMD300_C69689.html; LCSC Part Number: C69689
footprint Fuse-1812_
pins: 1, 2

## SCP60A4K
designator F?
Self Control Protector; Manufacturer Part Number: SCP60A4K
footprint SCP60a4k
pins: 1, 2, 3

## SHV2920P500-30-AA
designator F?
30V 5A 5A 2920 Resettable Fuses ROHS; Manufacturer: PTTC(Polytronics Tech); Manufacturer Part Number: SHV2920P500-30-AA; Item Type: Fuse; ComponentLink1Description: LCSC; ComponentLink1URL: https://www.lcsc.com/product-detail/Resettable-Fuses_PTTC-Polytronics-Tech-SHV2920P500-30-AA_C495350.html; Package: 2920; LCSC Part Number: C495350
footprint Fuse-2920
pins: 1, 2

## SMD300L-24V
designator F?
24V 3A 100A 1.5W 6A -40℃~+85℃ 0.012Ω 20s 0.048Ω SMD,6.73x4.8x0.6mm Resettable Fuses ROHS; Manufacturer: TECHFUSE; Manufacturer Part Number: SMD300L-24V; Item Type: Fuse; Package: SMD,6.73x4.8x0.6mm; LCSC Part Number: C2895095; ComponentLink1Description: LCSC; ComponentLink1URL: https://www.lcsc.com/product-detail/Resettable-Fuses_TECHFUSE-SMD300L-24V_C2895095.html
footprint SMD300L-24V (24V 3A 100A 1.5W 6A -40?~+85? 0.012O 20s 0.048O SMD,6.73x4.8x0.6mm)
pins: 1, 2

## SMD0603-003/30N
designator F?
30V 30mA 20A 90mA 0603 Resettable Fuses ROHS; Manufacturer: BHFUSE; Manufacturer Part Number: SMD0603-003/30N; Supplier: LCSC; LCSC Part Number: C2687870; RoHS: No; ComponentLink1Description: LCSC; ComponentLink1URL: https://www.lcsc.com/product-detail/Resettable-Fuses_BORN-SMD0603-003-30N_C2687870.html
footprint Fuse-0603
pins: 1, 2

## SMD0603-050
designator F?
6V 500mA 40A 1A 0603 Resettable Fuses ROHS; Manufacturer: TECHFUSE; Manufacturer Part Number: SMD0603-050; Item Type: Fuse; Supplier 1: LCSC; RoHS: No; Category: Uncategorized; Supplier Part Number 1: C69679; LCSC Part Number: C69679; ComponentLink1Description: LCSC; ComponentLink1URL: https://www.lcsc.com/product-detail/Resettable-Fuses_TECHFUSE-SMD0603-050_C69679.html
footprint Fuse-0603
pins: 1, 2

## SMD0805B035TF
designator F?
6V 350mA 100A 750mA 0805 Resettable Fuses ROHS; Manufacturer: Brightking; Manufacturer Part Number: SMD0805B035TF; Package: 0805; LCSC Part Number: C269103; Item Type: Resettable Fuses; ComponentLink1Description: LCSC; ComponentLink1URL: https://www.lcsc.com/product-detail/Resettable-Fuses_Brightking-SMD0805B035TF_C269103.html?s_z=n_SMD0805B035TF
footprint Fuse-0805
pins: 1, 2

## SMD0805B110TF
designator F?
PTC Resettable Fuse 6V 100A 2-Pin 0805 T/R; Manufacturer: Yageo; Manufacturer Part Number: SMD0805B110TF; Item Type: PTC Resettable Fuses; Supplier: Digikey; LCSC Part Number: C269107; RoHS: Yes; Stock: 3000; Pricing: 1=0.15, 5=0.126, 10=0.116, 50=0.0962, 100=0.0887, 250=0.07976, 500=0.07358, 1000=0.06788 (USD)
footprint Fuse-0805
pins: 1, 2

## SMD0805P020TF
designator F?
9V 200mA 100A 500mA 0805 Resettable Fuses ROHS; Manufacturer: RUILON; Manufacturer Part Number: SMD0805P020TF; Item Type: Fuse; Package: 0805; LCSC Part Number: C20976; ComponentLink1Description: LCSC; ComponentLink1URL: https://www.lcsc.com/product-detail/Resettable-Fuses_RUILON-Shenzhen-Ruilongyuan-Elec-SMD0805P020TF_C20976.html
footprint Fuse-0805
pins: 1, 2

## SMD1206K200SF6V
designator F?
6V 2A 100A 0.8W 3.5A -40℃~+85℃ 0.018Ω 1.5s 0.08Ω 1206 Resettable Fuses ROHS; Manufacturer: KAILONG; Manufacturer Part Number: SMD1206K200SF6V; Item Type: Fuse; Package: 1206; LCSC Part Number: C2960517; ComponentLink1Description: LCSC; ComponentLink1URL: https://www.lcsc.com/product-detail/Resettable-Fuses_KAILONG-SMD1206K200SF6V_C2960517.html
footprint Fuse 1206 (3216 Metric) (0.126" L x 0.062" W x 0.026" H (3.20mm x 1.58mm x 0.65mm))
pins: 1, 2

## SMD2018-200
designator F?
10V 2A 100A 4A 2018 Resettable Fuses ROHS; Manufacturer: Tech Fuse; Manufacturer Part Number: SMD2018-200; Item type: Fuse; ComponentLink1Description: LCSC; ComponentLink1URL: https://www.lcsc.com/product-detail/Resettable-Fuses_TECHFUSE-SMD2018-200_C70152.html; Package: 2018; LCSC Part Number: C70152
footprint SMD2018-200
pins: 1, 2